# Altium footprint library CAP_EEETC1C101XV.PcbLib: 1 footprints
Each footprint in its own frame and in the unit in brackets; x right, y up, seen from the top. Pads: shape width x height; smd on the part's side, far side on the other; paste and mask are expansions set on the pad; w line width, h text height; cw(c..) or ccw(c..) is an arc to the next point about the centre after c.
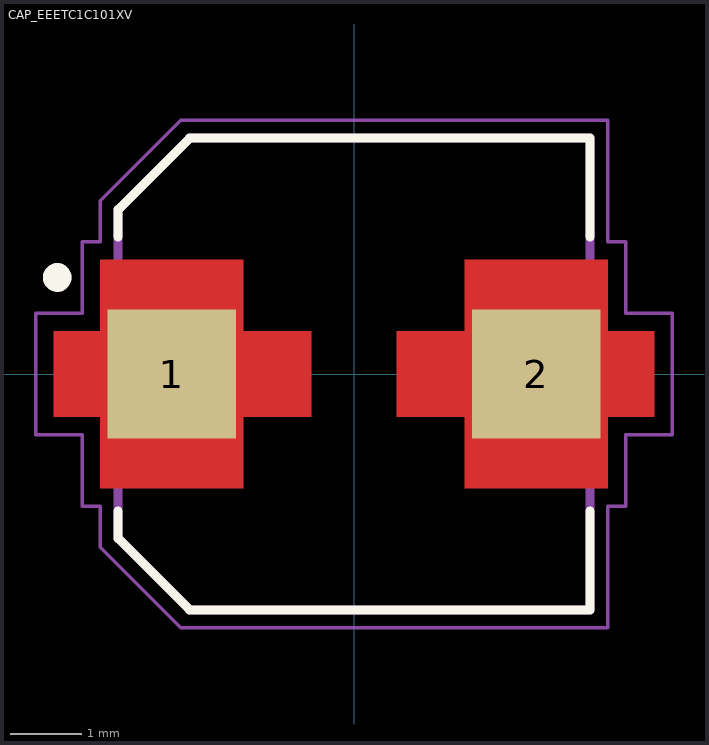
[diagram p0: the footprint, top view; thin cyan lines are the x and y axes]

## CAP_EEETC1C101XV [mm]
height 8
pads (2):
  rect 1.8x1.8 smd paste-2 mask+0: 1(-2.55,0) 2(2.55,0)
Top Layer:
  region: -1.55,0.6 -0.6,0.6 -0.6,-0.6 -1.55,-0.6 -1.55,-1.6 -3.55,-1.6 -3.55,-0.6 -4.2,-0.6 -4.2,0.6 -3.55,0.6 -3.55,1.6 -1.55,1.6
  region: 3.55,0.6 4.2,0.6 4.2,-0.6 3.55,-0.6 3.55,-1.6 1.55,-1.6 1.55,-0.6 0.6,-0.6 0.6,0.6 1.55,0.6 1.55,1.6 3.55,1.6
Top Overlay:
  circle w0.2: c-4.15,1.35 r0.1
  lines w0.127: -3.3,-1.92 -3.3,-2.3 -2.3,-3.3 3.3,-3.3 3.3,-1.92 ; -3.3,1.92 -3.3,2.3 -2.3,3.3 3.3,3.3 3.3,1.92
Top Paste:
  region: -1.55,0.6 -0.6,0.6 -0.6,-0.6 -1.55,-0.6 -1.55,-1.6 -3.55,-1.6 -3.55,-0.6 -4.2,-0.6 -4.2,0.6 -3.55,0.6 -3.55,1.6 -1.55,1.6
  region: 3.55,0.6 4.2,0.6 4.2,-0.6 3.55,-0.6 3.55,-1.6 1.55,-1.6 1.55,-0.6 0.6,-0.6 0.6,0.6 1.55,0.6 1.55,1.6 3.55,1.6
Top Solder:
  region: -1.45,0.7 -0.5,0.7 -0.5,-0.7 -1.45,-0.7 -1.45,-1.7 -3.65,-1.7 -3.65,-0.7 -4.3,-0.7 -4.3,0.7 -3.65,0.7 -3.65,1.7 -1.45,1.7
  region: 3.65,0.7 4.3,0.7 4.3,-0.7 3.65,-0.7 3.65,-1.7 1.45,-1.7 1.45,-0.7 0.5,-0.7 0.5,0.7 1.45,0.7 1.45,1.7 3.65,1.7
Mechanical 13:
  circle w0.2: c-4.15,1.35 r0.1
  lines w0.127: -3.3,-2.3 -3.3,2.3 -2.3,3.3 3.3,3.3 3.3,-3.3 -2.3,-3.3 -3.3,-2.3
Mechanical 15:
  lines w0.05: -4.45,-0.85 -3.8,-0.85 -3.8,-1.85 -3.55,-1.85 -3.55,-2.425 -2.425,-3.55 3.55,-3.55 3.55,-1.85 3.8,-1.85 3.8,-0.85 4.45,-0.85 4.45,0.85 3.8,0.85 3.8,1.85 3.55,1.85 3.55,3.55 -2.425,3.55 -3.55,2.425 -3.55,1.85 -3.8,1.85 -3.8,0.85 -4.45,0.85 -4.45,-0.85
3D body "step_temp.STEP": height 8, standoff 0, extent -3.65,-3.3 3.65,3.3